# Altium footprint library Connectors.PcbLib: 120 footprints (part 6 of 8)
Each footprint in its own frame and in the unit in brackets; x right, y up, seen from the top. Pads: shape width x height; smd on the part's side, far side on the other; paste and mask are expansions set on the pad; w line width, h text height; cw(c..) or ccw(c..) is an arc to the next point about the centre after c.
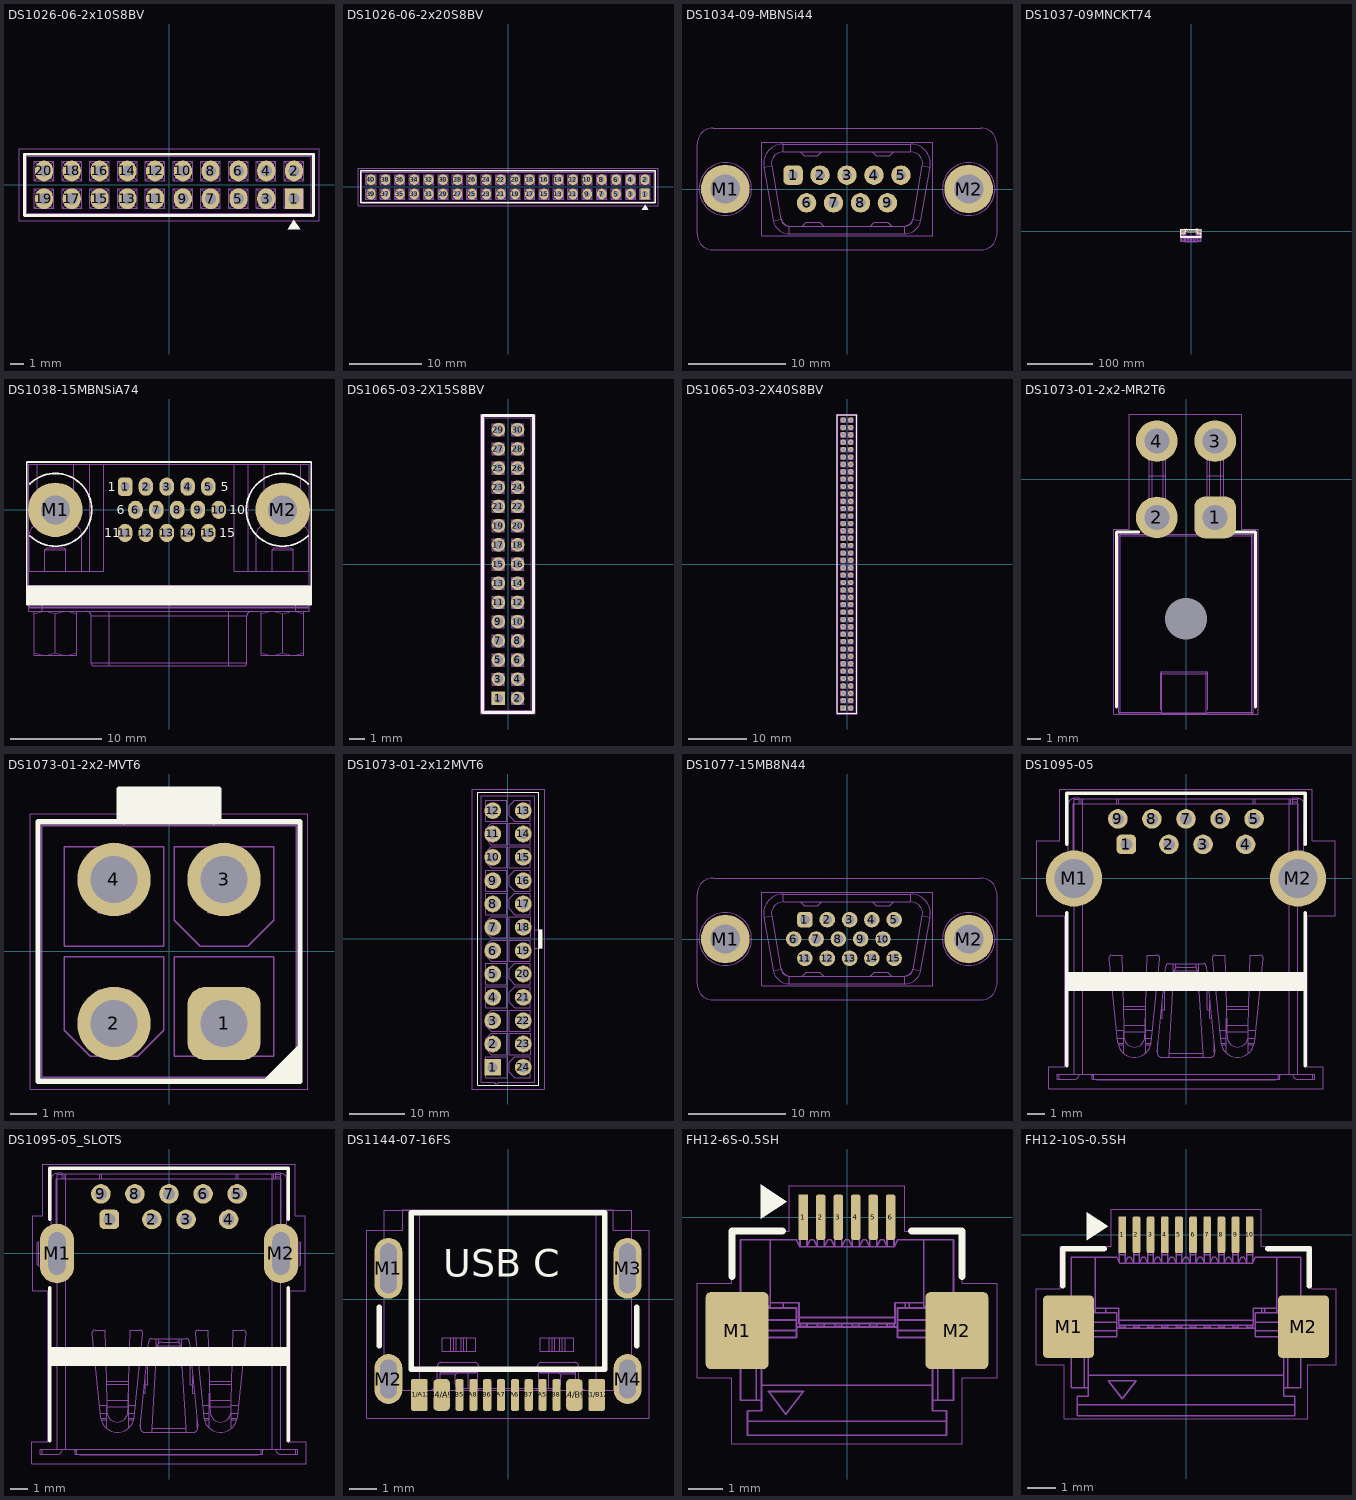
[diagram p5: the footprints below, top view; thin cyan lines are the x and y axes]

## DS1026-06-2x10S8BV [mm]
pads (20):
  rect 1.3x1.5 hole 0.8: 1(9,-1)
  oval 1.3x1.5 hole 0.8: 2(9,1) 3(7,-1) 4(7,1) 5(5,-1) 6(5,1) 7(3,-1) 8(3,1) 9(1,-1) 10(1,1) 11(-1,-1) 12(-1,1) 13(-3,-1) 14(-3,1) 15(-5,-1) 16(-5,1) 17(-7,-1) 18(-7,1) 19(-9,-1) 20(-9,1)
Top Overlay:
  region: 9,-2.5 8.533,-3.2 9.467,-3.2
  lines w0.2: -10.4,-2.2 -10.4,2.2 10.4,2.2 10.4,-2.2 -10.4,-2.2
Top Courtyard:
  lines w0.025: -10.8,-2.6 -10.8,2.6 10.8,2.6 10.8,-2.6 -10.8,-2.6
Top Assembly:
  drawing of 364 lines, arcs and shapes, not listed
  text ".Designator" at -4.511,3.047 h2
3D body "DS1026-06-2X10S8BV_.x_t": height 4.31, standoff -2.69, extent -10.25,-2.05 10.25,2.05

## DS1026-06-2x20S8BV [mm]
pads (40):
  rect 1.3x1.5 hole 0.8: 1(19,-1)
  oval 1.3x1.5 hole 0.8: 2(19,1) 3(17,-1) 4(17,1) 5(15,-1) 6(15,1) 7(13,-1) 8(13,1) 9(11,-1) 10(11,1) 11(9,-1) 12(9,1) 13(7,-1) 14(7,1) 15(5,-1) 16(5,1) 17(3,-1) 18(3,1) 19(1,-1) 20(1,1) 21(-1,-1) 22(-1,1) 23(-3,-1) 24(-3,1) 25(-5,-1) 26(-5,1) 27(-7,-1) 28(-7,1) 29(-9,-1) 30(-9,1) 31(-11,-1) 32(-11,1) 33(-13,-1) 34(-13,1) 35(-15,-1) 36(-15,1) 37(-17,-1) 38(-17,1) 39(-19,-1) 40(-19,1)
Top Overlay:
  region: 19,-2.5 18.533,-3.2 19.467,-3.2
  lines w0.2: -20.4,-2.2 20.4,-2.2 20.4,2.2 -20.4,2.2 -20.4,-2.2
Top Courtyard:
  lines w0.025: -20.8,-2.6 20.8,-2.6 20.8,2.6 -20.8,2.6 -20.8,-2.6
Top Assembly:
  drawing of 724 lines, arcs and shapes, not listed
  text ".Designator" at -4.511,3.047 h2
3D body "DS1026-06-2X20S8BV.x_t": height 4.31, standoff -2.69, extent -20.25,-2.05 20.25,2.05

## DS1034-09-MBNSi44 [mm] "D-SUB 9 pin with screw"
height 10.8
pads (11):
  rrect50% 2x2 hole 1: 1(-5.54,1.42)
  round 2 hole 1: 2(-2.77,1.42) 3(0,1.42) 4(2.77,1.42) 5(5.54,1.42) 6(-4.155,-1.42) 7(-1.385,-1.42) 8(1.385,-1.42) 9(4.155,-1.42)
  round 5 hole 3 mask+0: M1(-12.495,0) M2(12.495,0)
Top Courtyard:
  circle w0.025: c12.495,0 r2.7
  circle w0.025: c-12.495,0 r2.7
  lines w0.025: -8.75,-4.8 8.8,-4.8 8.8,4.8 -8.75,4.8 -8.75,-4.8
Top Assembly:
  drawing of 359 lines, arcs and shapes, not listed
  text "5" at 5.243,2.625 h1
  text "1" at -5.762,2.613 h1
  text "6" at -4.288,-3.251 h1
  text "9" at 4.023,-3.251 h1
  text ".Designator" at -4.511,4.847 h2
3D body "DS1034-09-MBNSi44.x_t": height 13, standoff -3.6, extent -15.4,-6.25 15.4,6.25

## DS1037-09MNCKT74 [mm] "D-SUB 9 pin with screw, right angle, 7.2mm"
height 12.5
pads (11):
  rrect50% 2x2 hole 1: 1(-5.54,1.42)
  round 2 hole 1: 2(-2.77,1.42) 3(0,1.42) 4(2.77,1.42) 5(5.54,1.42) 6(-4.155,-1.42) 7(-1.385,-1.42) 8(1.385,-1.42) 9(4.155,-1.42)
  round 6 hole 3.2 mask+0: M1(-12.5,0)
  round 6 hole 3.2 unplated mask+0: M2(12.5,0)
Top Overlay:
  rectangle: -15.7,-8.9 15.7,-7.1
  lines w0.2: -15.251,-2.904 ccw(c-12.5,0) -9.959,3.089 ; 9.959,3.089 ccw(c12.5,0) 15.251,-2.904 ; -15.7,-8.9 -15.7,3.3 -15.2,3.3 15.7,3.3 15.7,-8.9 -15.7,-8.9
  text "1" at -7.867,0.92 h1
  text "5" at 7.367,0.92 h1
  text "9" at 5.982,-1.92 h1
  text "6" at -6.648,-1.92 h1
Top Courtyard:
  lines w0.025: -15.7,-15 -15.7,3.3 15.7,3.3 15.7,-15 9.75,-15 9.75,-15.9 -8.6,-15.9 -9.75,-15.9 -9.75,-15 -15.7,-15
Top Assembly:
  lines w0.05: -15.4,-7.1 15.4,-7.1 ; -15.4,-5.5 -7.7,-5.5 -7.7,3 ; -15.395,-5.5 -15.395,-4.59 cw(c-14.795,-4.59) -14.795,-3.99 -14.3,-3.99 -14.3,0.3 ; -15.209,-9.52 -15.209,-14 ccw(c-14.709,-14) -14.709,-14.5 -10.281,-14.5 ccw(c-10.281,-14) -9.781,-14 -9.781,-9.52 ; -14.45,-0.3 -13.15,-0.3 ; -14.45,-0.25 cw(c-12.5,-0.25) -10.55,-0.25 ; -14.45,3 -14.45,-2.54 ccw(c-12.5,-2.54) -14.3,-3.29 ; -14.395,-9.1 -14.395,-9.09 ; -14.371,0.3 -13.15,0.3 -13.15,-2.5 ; -13.852,-14.5 -13.852,-9.5 ; -13.845,-5.5 -13.845,-3.1 ; -13.6,-9.5 -13.6,-9.1 ; -13.6,-9.09 -13.6,-7.1 ; -11.85,-2.5 -11.85,0.3 -10.629,0.3 ; -11.85,-0.3 -10.55,-0.3 ; -11.167,-9.501 -11.138,-14.501 ; -11.145,-5.5 -11.145,-3.1 ; -10.7,-3.29 ccw(c-12.5,-2.54) -10.55,-2.54 -10.55,3 ; -10.7,0.3 -10.7,-3.99 -10.195,-3.99 cw(c-10.195,-4.59) -9.595,-4.59 -9.595,-5.5 ; -10.595,-9.1 -10.595,-9.09 ; -9.885,-9.5 cw(c-9.885,-10.1) -9.285,-10.079 ; -9.08,-15.114 ccw(c-8.781,-15.1) -8.781,-15.4 8.781,-15.4 ccw(c8.781,-15.1) 9.08,-15.115 ; -8.7,-5.5 -8.7,3 ; -6.786,-9.5 -6.786,-10.079 ; -6.582,-15.4 -6.582,-15.11 ; -6.04,-9.1 -6.04,-9.09 ; -5.04,-9.1 -5.04,-9.09 ; -4.655,-9.1 -4.655,-9.09 ; -4.65,-13.408 -3.15,-13.408 ; -3.655,-9.1 -3.655,-9.09 ; -3.27,-9.1 -3.27,-9.09 ; -2.27,-9.1 -2.27,-9.09 ; -1.885,-9.1 -1.885,-9.09 ; -0.885,-9.1 -0.885,-9.09 ; -0.75,-13.408 0.75,-13.408 ; -0.5,-9.1 -0.5,-9.09 ; 0.5,-9.1 0.5,-9.09 ; 0.885,-9.1 0.885,-9.09 ; 1.885,-9.1 1.885,-9.09 ; 2.27,-9.1 2.27,-9.09 ; 3.15,-13.408 4.65,-13.408 ; 3.27,-9.1 3.27,-9.09 ; 3.655,-9.1 3.655,-9.09 ; 4.655,-9.1 4.655,-9.09 ; 5.04,-9.1 5.04,-9.09 ; 6.04,-9.1 6.04,-9.09 ; 6.582,-15.4 6.582,-15.11 ; 6.786,-9.5 6.786,-10.079 ; 7.7,3 7.7,-5.5 15.4,-5.5 ; 8.7,-5.5 8.7,3 ; 9.285,-10.078 cw(c9.885,-10.1) 9.885,-9.5 ; 9.595,-5.5 9.595,-4.59 cw(c10.195,-4.59) 10.195,-3.99 10.7,-3.99 10.7,0.3 ; 9.781,-9.52 9.781,-14 ccw(c10.281,-14) 10.281,-14.5 14.709,-14.5 ccw(c14.709,-14) 15.209,-14 15.209,-9.52 ; 10.55,-0.3 11.85,-0.3 ; 10.55,-0.25 cw(c12.5,-0.25) 14.45,-0.25 ; 10.55,3 10.55,-2.54 ccw(c12.5,-2.54) 10.7,-3.29 ; 10.595,-9.1 10.595,-9.09 ; 10.629,0.3 11.85,0.3 11.85,-2.5 ; 11.138,-14.501 11.167,-9.501 ; 11.145,-5.5 11.145,-3.1 ; 13.15,-2.5 13.15,0.3 14.371,0.3 ; 13.15,-0.3 14.45,-0.3 ; 13.6,-9.5 13.6,-9.1 ; 13.6,-9.09 13.6,-7.1 ; 13.845,-5.5 13.845,-3.1 ; 13.852,-14.5 13.852,-9.5 ; 14.3,-3.29 ccw(c12.5,-2.54) 14.45,-2.54 14.45,3 ; 14.3,0.3 14.3,-3.99 14.795,-3.99 cw(c14.795,-4.59) 15.395,-4.59 15.395,-5.5 ; 14.395,-9.1 14.395,-9.09 ; -13.845,-3.1 -11.145,-3.1 ; -13.845,-3.1 -13.499,-2.5 -11.491,-2.5 -11.145,-3.1 ; -6.786,-10.079 ccw(c-8.128,-77.246) -9.285,-10.076 -9.08,-15.112 ccw(c-7.938,140.625) -6.582,-15.11 ; -6.786,-10.079 -6.582,-15.11 ; -6.786,-10.079 6.786,-10.079 ; -6.582,-15.11 6.582,-15.11 ; 6.582,-15.11 ccw(c7.924,119.27) 9.08,-15.112 9.285,-10.076 ccw(c8.143,-87.965) 6.786,-10.079 ; 6.582,-15.11 6.786,-10.079 ; 11.145,-3.1 13.845,-3.1 ; 11.145,-3.1 11.491,-2.5 13.499,-2.5 13.845,-3.1 ; -15.4,-9.5 -15.4,-9.1 15.4,-9.1 15.4,-9.5 -15.4,-9.5 ; -15.4,-9.09 -15.4,3 15.4,3 15.4,-9.09 -15.4,-9.09 ; -4.65,-13.411 -3.15,-13.411 -3.15,-11.413 -4.65,-11.413 -4.65,-13.411 ; -0.75,-13.411 0.75,-13.411 0.75,-11.413 -0.75,-11.413 -0.75,-13.411 ; 3.15,-13.411 4.65,-13.411 4.65,-11.413 3.15,-11.413 3.15,-13.411
  text ".Designator" at -6.763,-2.429 h3
3D body "DS1037-09M.x_t": height 12.57, standoff -3.85, extent -15.4,-15.4 15.4,3

## DS1038-15MBNSiA74 [mm] "D-SUB 15 pin with screw, right angle, 7.2mm"
height 12.5
pads (17):
  rrect50% 1.6x2 hole 1: 1(-4.83,2.54)
  oval 1.6x2 hole 1: 2(-2.54,2.54) 3(-0.25,2.54) 4(2.04,2.54) 5(4.33,2.54) 6(-3.685,0) 7(-1.395,0) 8(0.895,0) 9(3.185,0) 10(5.475,0) 11(-4.83,-2.54) 12(-2.54,-2.54) 13(-0.25,-2.54) 14(2.04,-2.54) 15(4.33,-2.54)
  round 6 hole 3.2 mask+0: M1(-12.495,0)
  round 6 hole 3.2 unplated mask+0: M2(12.495,0)
Top Overlay:
  rectangle: -15.65,-10.45 15.65,-8.3
  lines w0.2: -15.301,-2.851 ccw(c-12.495,0) -15.301,2.851 ; 15.301,-2.851 cw(c12.495,0) 15.301,2.851 ; -15.65,-10.45 15.65,-10.45 15.65,5.25 -15.65,5.25 -15.65,-10.45
  text "15" at 5.545,-3.04 h1
  text "10" at 6.64,-0.5 h1
  text "5" at 5.712,2.04 h1
  text "1" at -6.712,2.04 h1
  text "11" at -7.128,-3.04 h1
  text "6" at -5.733,-0.5 h1
Top Assembly:
  lines w0.05: -15.42,-8.27 15.42,-8.27 ; -15.42,-6.77 -7.2,-6.77 -7.2,5.03 ; -15.37,-6.77 -15.37,-2.6 cw(c-14.57,-2.6) -14.57,-1.8 -14.345,-1.8 -14.345,0.2 ; -15.32,-10.67 ccw(c-15.32,-10.77) -15.42,-10.77 ; -14.495,0 -14.495,5.03 ; -14.485,-0.2 -14.345,-0.2 ; -14.485,0.2 -13.095,0.2 -13.095,-1.65 ccw(c-12.495,-1.65) -11.895,-1.65 -11.895,0.2 -10.505,0.2 ; -14.345,-0.76 cw(c-12.495,0) -10.645,-0.76 ; -14.345,-0.6 -13.095,-0.6 ; -13.92,-11.17 -13.92,-8.27 ; -13.855,-15.971 -14.845,-15.697 ; -13.855,-11.169 -14.845,-11.443 ; -13.645,-6.77 -13.645,-4.42 ; -13.485,-15.971 -12.495,-15.697 ; -13.485,-11.169 -12.495,-11.443 ; -13.027,-1.928 ccw(c-12.495,0) -11.963,-1.928 ; -11.895,-0.6 -10.645,-0.6 ; -11.505,-15.971 -12.495,-15.697 ; -11.505,-11.169 -12.495,-11.443 ; -11.345,-6.77 -11.345,-4.42 ; -11.135,-15.971 -10.145,-15.697 ; -11.135,-11.169 -10.145,-11.443 ; -10.645,-0.2 -10.505,-0.2 ; -10.645,0.2 -10.645,-1.8 -10.42,-1.8 cw(c-10.42,-2.6) -9.62,-2.6 -9.62,-6.77 ; -10.495,0 -10.495,5.03 ; -9.066,-11.17 cw(c-9.066,-11.67) -8.566,-11.67 ; -8.7,-6.77 -8.7,5.03 ; -6.566,-17.17 -6.566,-11.17 ; 6.566,-17.17 6.566,-11.17 ; 7.2,5.03 7.2,-6.77 15.42,-6.77 ; 8.7,-6.77 8.7,5.03 ; 9.066,-11.17 ccw(c9.066,-11.67) 8.566,-11.67 ; 9.62,-6.77 9.62,-2.6 cw(c10.42,-2.6) 10.42,-1.8 10.645,-1.8 10.645,0.2 ; 10.495,0 10.495,5.03 ; 10.505,-0.2 10.645,-0.2 ; 10.505,0.2 11.895,0.2 11.895,-1.65 ccw(c12.495,-1.65) 13.095,-1.65 13.095,0.2 14.485,0.2 ; 10.645,-0.76 cw(c12.495,0) 14.345,-0.76 ; 10.645,-0.6 11.895,-0.6 ; 11.135,-15.971 10.145,-15.697 ; 11.135,-11.169 10.145,-11.443 ; 11.345,-6.77 11.345,-4.42 ; 11.505,-15.971 12.495,-15.697 ; 11.505,-11.169 12.495,-11.443 ; 11.963,-1.928 ccw(c12.495,0) 13.027,-1.928 ; 13.095,-0.6 14.345,-0.6 ; 13.485,-15.971 12.495,-15.697 ; 13.485,-11.169 12.495,-11.443 ; 13.645,-6.77 13.645,-4.42 ; 13.855,-15.971 14.845,-15.697 ; 13.855,-11.169 14.845,-11.443 ; 13.92,-11.17 13.92,-8.27 ; 14.345,-0.2 14.485,-0.2 ; 14.345,0.2 14.345,-1.8 14.57,-1.8 cw(c14.57,-2.6) 15.37,-2.6 15.37,-6.77 ; 14.495,0 14.495,5.03 ; 15.32,-10.67 cw(c15.32,-10.77) 15.42,-10.77 ; -15.42,-10.77 -15.42,-11.17 15.42,-11.17 15.42,-10.77 ; -15.42,-10.77 15.42,-10.77 ; -14.845,-15.697 -14.845,-11.443 ; -14.845,-15.697 -14.845,-15.97 -10.145,-15.97 -10.145,-15.697 ; -14.845,-11.443 -14.845,-11.17 -10.145,-11.17 -10.145,-11.443 ; -13.645,-4.42 -11.345,-4.42 ; -13.645,-4.42 -13.395,-4.17 -11.595,-4.17 -11.345,-4.42 ; -12.495,-15.697 -12.495,-11.443 ; -10.145,-15.697 -10.145,-11.443 ; -8.566,-16.82 ccw(c-8.216,-16.82) -8.216,-17.17 8.216,-17.17 ccw(c8.216,-16.82) 8.566,-16.82 ; -8.566,-16.82 8.566,-16.82 ; -8.566,-16.82 -8.566,-11.67 ; -8.566,-11.67 8.566,-11.67 ; 8.566,-16.82 8.566,-11.67 ; 10.145,-15.697 10.145,-11.443 ; 10.145,-15.697 10.145,-15.97 14.845,-15.97 14.845,-15.697 ; 10.145,-11.443 10.145,-11.17 14.845,-11.17 14.845,-11.443 ; 11.345,-4.42 13.645,-4.42 ; 11.345,-4.42 11.595,-4.17 13.395,-4.17 13.645,-4.42 ; 12.495,-15.697 12.495,-11.443 ; 14.845,-15.697 14.845,-11.443 ; -15.42,-10.67 15.42,-10.67 15.42,5.03 -15.42,5.03 -15.42,-10.67
  text ".Designator" at -6.763,-1.679 h3
3D body "DHR-15M.x_t": height 12.52, standoff -3.98, extent -15.42,-17.17 15.42,5.03

## DS1065-03-2X15S8BV [mm] "Female header, pitch 1.27mm, Vertical"
height 4.4
pads (30):
  rect 0.9x0.9 / inner rect 1.1x0.9 / far side rect 0.9x0.9 hole 0.6: 1(-0.635,-8.89)
  round 0.9 / inner oval 1.1x0.9 / far side round 0.9 hole 0.6: 2(0.635,-8.89) 3(-0.635,-7.62) 4(0.635,-7.62) 5(-0.635,-6.35) 6(0.635,-6.35) 7(-0.635,-5.08) 8(0.635,-5.08) 9(-0.635,-3.81) 10(0.635,-3.81) 11(-0.635,-2.54) 12(0.635,-2.54) 13(-0.635,-1.27) 14(0.635,-1.27) 15(-0.635,0) 16(0.635,0) 17(-0.635,1.27) 18(0.635,1.27) 19(-0.635,2.54) 20(0.635,2.54) 21(-0.635,3.81) 22(0.635,3.81) 23(-0.635,5.08) 24(0.635,5.08) 25(-0.635,6.35) 26(0.635,6.35) 27(-0.635,7.62) 28(0.635,7.62) 29(-0.635,8.89) 30(0.635,8.89)
Top Overlay:
  lines w0.2: -1.7,-9.825 -1.7,9.825 1.7,9.825 1.7,-9.825 -1.7,-9.825
Top Courtyard:
  lines w0.025: -1.8,-9.925 -1.8,9.925 1.8,9.925 1.8,-9.925 -1.8,-9.925
Top Assembly:
  drawing of 364 lines, arcs and shapes, not listed
  text ".Designator" at 2.839,-3.378 h1.5
3D body "DS1065-03-2X15S8BV.x_t": height 4.4, standoff -2.3, extent -1.55,-9.685 1.55,9.685

## DS1065-03-2X40S8BV [mm] "Female header, pitch 1.27mm, Vertical"
height 4.4
pads (80):
  rect 0.9x0.9 / inner rect 1.1x0.9 / far side rect 0.9x0.9 hole 0.6: 1(-0.635,-24.765)
  round 0.9 / inner oval 1.1x0.9 / far side round 0.9 hole 0.6: 2(0.635,-24.765) 3(-0.635,-23.495) 4(0.635,-23.495) 5(-0.635,-22.225) 6(0.635,-22.225) 7(-0.635,-20.955) 8(0.635,-20.955) 9(-0.635,-19.685) 10(0.635,-19.685) 11(-0.635,-18.415) 12(0.635,-18.415) 13(-0.635,-17.145) 14(0.635,-17.145) 15(-0.635,-15.875) 16(0.635,-15.875) 17(-0.635,-14.605) 18(0.635,-14.605) 19(-0.635,-13.335) 20(0.635,-13.335) 21(-0.635,-12.065) 22(0.635,-12.065) 23(-0.635,-10.795) 24(0.635,-10.795) 25(-0.635,-9.525) 26(0.635,-9.525) 27(-0.635,-8.255) 28(0.635,-8.255) 29(-0.635,-6.985) 30(0.635,-6.985) 31(-0.635,-5.715) 32(0.635,-5.715) 33(-0.635,-4.445) 34(0.635,-4.445) 35(-0.635,-3.175) 36(0.635,-3.175) 37(-0.635,-1.905) 38(0.635,-1.905) 39(-0.635,-0.635) 40(0.635,-0.635) 41(-0.635,0.635) 42(0.635,0.635) 43(-0.635,1.905) 44(0.635,1.905) 45(-0.635,3.175) 46(0.635,3.175) 47(-0.635,4.445) 48(0.635,4.445) 49(-0.635,5.715) 50(0.635,5.715) 51(-0.635,6.985) 52(0.635,6.985) 53(-0.635,8.255) 54(0.635,8.255) 55(-0.635,9.525) 56(0.635,9.525) 57(-0.635,10.795) 58(0.635,10.795) 59(-0.635,12.065) 60(0.635,12.065) 61(-0.635,13.335) 62(0.635,13.335) 63(-0.635,14.605) 64(0.635,14.605) 65(-0.635,15.875) 66(0.635,15.875) 67(-0.635,17.145) 68(0.635,17.145) 69(-0.635,18.415) 70(0.635,18.415) 71(-0.635,19.685) 72(0.635,19.685) 73(-0.635,20.955) 74(0.635,20.955) 75(-0.635,22.225) 76(0.635,22.225) 77(-0.635,23.495) 78(0.635,23.495) 79(-0.635,24.765) 80(0.635,24.765)
Top Overlay:
  lines w0.2: -1.7,-25.7 1.7,-25.7 1.7,25.7 -1.7,25.7 -1.7,-25.7
Top Courtyard:
  lines w0.025: -1.8,-25.8 -1.8,25.8 1.8,25.8 1.8,-25.8 -1.8,-25.8
Top Assembly:
  drawing of 964 lines, arcs and shapes, not listed
  text ".Designator" at 2.839,-3.378 h1.5
3D body "DS1065-03-2X40S8BV.x_t": height 4.4, standoff -2.3, extent -1.55,-25.56 1.55,25.56

## DS1073-01-2x2-MR2T6 [mm]
height 0.6
pads (5):
  rrect50% 3x3 hole 1.8 mask+0.05: 1(2.1,-2.75)
  round 3 hole 1.8 mask+0.05: 2(-2.1,-2.75) 3(2.1,2.75) 4(-2.1,2.75)
  rect 0x0 hole 3 unplated paste-2539.97 mask+0.05: HOLE(0,-10.05)
Top Overlay:
  lines w0.2: -5,-16.4 -5,-3.8 -3.4,-3.8 ; 3.4,-3.8 5,-3.8 5,-16.4
Top Courtyard:
  lines w0.025: -5.2,-16.9 -5.2,-3.6 -4.1,-3.6 -4.1,4.7 -2.1,4.7 4,4.7 4,-3.6 5.2,-3.6 5.2,-16.9 -5.2,-16.9
Top Assembly:
  lines w0.05: -2.64,-3.975 -2.64,0.255 ; -2.44,-3.975 -2.44,0.255 ; -1.83,-16.589 -1.83,-13.965 ; -1.783,-16.775 -4.75,-16.775 ; -1.763,-16.808 -1.75,-16.81 -1.73,-16.81 ; -1.73,-16.841 -1.73,-16.81 ; -1.64,-3.975 -1.64,0.255 ; -1.44,-3.975 -1.44,0.255 ; -1.44,-2.375 -1.43,-2.385 -1.43,-3.975 ; 1.47,-16.841 1.47,-16.81 ; 1.503,-16.808 1.49,-16.81 1.47,-16.81 ; 1.52,-3.975 1.52,0.255 ; 1.523,-16.775 4.75,-16.775 ; 1.57,-16.589 1.57,-13.965 ; 1.72,-3.975 1.72,0.255 ; 2.52,-3.975 2.52,0.255 ; 2.72,-3.975 2.72,0.255 ; -4.85,-16.775 ccw(c-4.75,-16.775) -4.75,-16.875 ; -4.85,-16.775 -4.75,-16.775 ; -4.85,-16.775 -4.85,-4.075 ; -4.85,-4.075 cw(c-4.75,-4.075) -4.75,-3.975 ; -4.85,-4.075 -4.75,-4.075 ; -4.75,-16.875 -4.75,-16.775 ; -4.75,-16.875 4.75,-16.875 ; -4.75,-16.775 -4.75,-4.075 ; -4.75,-4.075 4.75,-4.075 ; -4.75,-4.075 -4.75,-3.975 ; -4.75,-3.975 4.75,-3.975 ; -2.64,0.255 -2.44,0.255 ; -2.64,0.255 -2.64,3.055 -2.44,3.255 ; -2.44,0.255 -1.64,0.255 ; -2.44,0.255 -2.44,3.255 ; -2.44,3.255 -1.64,3.255 ; -1.83,-13.965 cw(c-1.73,-13.965) -1.73,-13.865 ; -1.83,-13.965 -1.828,-13.974 -1.822,-13.982 -1.813,-13.99 -1.801,-13.997 -1.786,-14.003 -1.768,-14.007 -1.75,-14.01 -1.73,-14.01 ; -1.73,-16.81 1.47,-16.81 ; -1.73,-16.81 -1.73,-14.01 ; -1.73,-14.01 -1.73,-13.865 ; -1.73,-14.01 1.47,-14.01 ; -1.73,-13.865 1.47,-13.865 1.47,-13.868 ; -1.64,0.255 -1.44,0.255 ; -1.64,0.255 -1.64,3.255 ; -1.64,3.255 -1.44,3.055 -1.44,0.255 ; 1.47,-16.81 1.47,-14.01 ; 1.47,-14.01 1.47,-13.868 ; 1.47,-14.01 1.49,-14.01 1.508,-14.007 1.526,-14.003 1.541,-13.997 1.553,-13.99 1.562,-13.982 1.568,-13.974 1.57,-13.965 ; 1.47,-13.868 cw(c1.469,-13.969) 1.57,-13.965 ; 1.52,0.255 1.72,0.255 ; 1.52,0.255 1.52,3.055 1.72,3.255 ; 1.72,0.255 2.52,0.255 ; 1.72,0.255 1.72,3.255 ; 1.72,3.255 2.52,3.255 ; 2.52,0.255 2.72,0.255 ; 2.52,0.255 2.52,3.255 ; 2.52,3.255 2.72,3.055 2.72,0.255 ; 4.75,-16.875 ccw(c4.75,-16.775) 4.85,-16.775 ; 4.75,-16.875 4.75,-16.775 ; 4.75,-16.775 4.75,-4.075 ; 4.75,-16.775 4.85,-16.775 ; 4.75,-4.075 4.75,-3.975 ; 4.75,-4.075 4.85,-4.075 ; 4.75,-3.975 cw(c4.75,-4.075) 4.85,-4.075 ; 4.85,-16.775 4.85,-4.075
  text ".Designator" at -6.763,-11.179 h3
3D body "User Library-DS1073-01-2x2-MR2T6.STEP": height 11.44, standoff -3.15, extent -4.85,-16.88 4.85,3.25

## DS1073-01-2x2-MVT6 [mm]
height 0.6
pads (4):
  rrect50% 2.8x2.8 hole 1.8 mask+0.05: 1(2.1,-2.75)
  round 2.8 hole 1.8 mask+0.05: 2(-2.1,-2.75) 3(2.1,2.75) 4(-2.1,2.75)
Top Overlay:
  rectangle: -1.9,4.95 1.9,6.2
  region: 5,-4.95 5,-3.5 3.55,-4.95
  lines w0.2: -1.9,4.95 -1.9,6.2 1.9,6.2 1.9,4.95 ; -5,-4.95 -5,4.95 5,4.95 5,-4.95 -5,-4.95
Top Courtyard:
  lines w0.025: -5.3,-5.25 -5.3,5.25 5.3,5.25 5.3,-5.25 -5.3,-5.25
Top Assembly:
  lines w0.05: -2.725,-2.725 -1.475,-2.725 ; -2.725,-2.725 -2.444,-2.444 ; -2.725,-2.725 -2.725,-1.475 ; -2.725,-1.475 -1.475,-1.475 ; -2.725,-1.475 -2.444,-1.756 ; -2.725,1.475 -1.475,1.475 ; -2.725,1.475 -2.725,2.725 ; -2.725,1.475 -2.444,1.756 ; -2.725,2.725 -1.475,2.725 ; -2.725,2.725 -2.444,2.444 ; -2.444,-2.444 -2.444,-1.756 ; -2.444,-2.444 -1.756,-2.444 ; -2.444,-1.756 -1.756,-1.756 ; -2.444,1.756 -1.756,1.756 ; -2.444,1.756 -2.444,2.444 ; -2.444,2.444 -1.756,2.444 ; -1.756,-2.444 -1.475,-2.725 ; -1.756,-2.444 -1.756,-1.756 ; -1.756,-1.756 -1.475,-1.475 ; -1.756,1.756 -1.475,1.475 ; -1.756,1.756 -1.756,2.444 ; -1.756,2.444 -1.475,2.725 ; -1.7,4.8 -1.7,6.2 1.7,6.2 1.7,4.8 ; -1.7,4.8 -4.85,4.8 -4.85,-4.8 4.85,-4.8 4.85,4.8 1.7,4.8 ; -1.7,4.8 1.7,4.8 ; -1.475,-2.725 -1.475,-1.475 ; -1.475,1.475 -1.475,2.725 ; 1.475,-2.725 2.725,-2.725 ; 1.475,-2.725 1.475,-1.475 ; 1.475,-2.725 1.756,-2.444 ; 1.475,-1.475 1.756,-1.756 ; 1.475,-1.475 2.725,-1.475 ; 1.475,1.475 2.725,1.475 ; 1.475,1.475 1.475,2.725 ; 1.475,1.475 1.756,1.756 ; 1.475,2.725 2.725,2.725 ; 1.475,2.725 1.756,2.444 ; 1.756,-2.444 2.444,-2.444 ; 1.756,-2.444 1.756,-1.756 ; 1.756,-1.756 2.444,-1.756 ; 1.756,1.756 2.444,1.756 ; 1.756,1.756 1.756,2.444 ; 1.756,2.444 2.444,2.444 ; 2.444,-2.444 2.725,-2.725 ; 2.444,-2.444 2.444,-1.756 ; 2.444,-1.756 2.725,-1.475 ; 2.444,1.756 2.444,2.444 ; 2.444,1.756 2.725,1.475 ; 2.444,2.444 2.725,2.725 ; 2.725,-2.725 2.725,-1.475 ; 2.725,1.475 2.725,2.725 ; -4,-3 -3,-4 -1.2,-4 -0.2,-3 -0.2,-0.2 -4,-0.2 -4,-3 ; -4,0.2 -0.2,0.2 -0.2,4 -4,4 -4,0.2 ; 0.2,-4 4,-4 4,-0.2 0.2,-0.2 0.2,-4 ; 0.2,1.2 1.2,0.2 3,0.2 4,1.2 4,4 0.2,4 0.2,1.2
  text ".Designator" at -6.763,-6.679 h3
3D body "DS1073-01-2x2-MVT6.STEP": height 13, standoff -3.2, extent -4.85,-4.8 4.85,6.2

## DS1073-01-2x12MVT6 [mm] "ATX24"
height 5.33
pads (24):
  rect 3x3 hole 1.8: 1(-2.75,-23.1)
  round 3 hole 1.8: 2(-2.75,-18.9) 3(-2.75,-14.7) 4(-2.75,-10.5) 5(-2.75,-6.3) 6(-2.75,-2.1) 7(-2.75,2.1) 8(-2.75,6.3) 9(-2.75,10.5) 10(-2.75,14.7) 11(-2.75,18.9) 12(-2.75,23.1) 13(2.75,23.1) 14(2.75,18.9) 15(2.75,14.7) 16(2.75,10.5) 17(2.75,6.3) 18(2.75,2.1) 19(2.75,-2.1) 20(2.75,-6.3) 21(2.75,-10.5) 22(2.75,-14.7) 23(2.75,-18.9) 24(2.75,-23.1)
Top Overlay:
  rectangle: 5.5,-1.7 6.25,1.7
  lines w0.2: 5.5,-26.4 5.5,26.3 ; 5.5,-26.3 -5.4,-26.3 -5.4,26.4 5.5,26.4
Top Courtyard:
  lines w0.025: -6.5,-27 -6.5,27 6.5,27 6.5,-27 -6.5,-27
Top Assembly:
  drawing of 417 lines, arcs and shapes, not listed
  text ".Designator" at 7.953,-4.511 h2
  text "+3.3V" at -4.15,22.098 h0.5
  text "GND" at 4.65,22.462 h0.5
  text "+12V" at -4.15,18.016 h0.5
  text "+5V" at 4.65,18.199 h0.5
  text "+12V" at -4.15,13.816 h0.5
  text "+5V" at 4.65,13.999 h0.5
  text "+5VSB" at -4.15,9.378 h0.5
  text "+5V" at 4.65,9.799 h0.5
  text "PGOOD" at -4.15,5.178 h0.5
  text "-5V" at 4.65,5.599 h0.5
  text "GND" at -4.15,1.462 h0.5
  text "GND" at 4.65,1.462 h0.5
  text "+5V" at -4.15,-2.801 h0.5
  text "GND" at 4.65,-2.738 h0.5
  text "GND" at -4.15,-6.938 h0.5
  text "GND" at 4.65,-6.938 h0.5
  text "+5V" at -4.15,-11.201 h0.5
  text "PSON" at 4.65,-11.361 h0.5
  text "GND" at -4.15,-15.338 h0.5
  text "GND" at 4.65,-15.338 h0.5
  text "+3.3V" at -4.15,-19.902 h0.5
  text "-12V" at 4.65,-19.784 h0.5
  text "+3.3V" at -4.15,-24.102 h0.5
  text "+3.3V" at 4.65,-24.102 h0.5
3D body "DS1073-01-2x12MVT6.x_t": height 12.8, standoff -3.2, extent -4.8,-26.097 6.1,25.75

## DS1077-15MB8N44 [mm] "D-SUB 15 pin with screw"
height 10.8
pads (17):
  rrect50% 1.6x1.6 hole 1: 1(-4.32,1.98)
  round 1.6 hole 1: 2(-2.03,1.98) 3(0.26,1.98) 4(2.55,1.98) 5(4.84,1.98) 6(-5.465,0) 7(-3.175,0) 8(-0.885,0) 9(1.405,0) 10(3.695,0) 11(-4.32,-1.98) 12(-2.03,-1.98) 13(0.26,-1.98) 14(2.55,-1.98) 15(4.84,-1.98)
  round 5 hole 3 mask+0: M1(-12.495,0) M2(12.495,0)
Top Courtyard:
  circle w0.025: c12.495,0 r2.7
  circle w0.025: c-12.495,0 r2.7
  lines w0.025: -8.75,-4.8 8.8,-4.8 8.8,4.8 -8.75,4.8 -8.75,-4.8
Top Assembly:
  drawing of 365 lines, arcs and shapes, not listed
  text ".Designator" at -4.511,4.847 h2
  text "5" at 5.243,2.625 h1
  text "1" at -5.762,2.613 h1
  text "11" at -5.389,-3.322 h1
  text "15" at 5.051,-3.316 h1
  text "6" at -6.714,-0.316 h1
  text "10" at 4.56,-0.316 h1
3D body "DS1077-15MB8N44.x_t": height 13, standoff -3.6, extent -15.4,-6.25 15.4,6.25

## DS1095-05 [mm]
height 0.6
pads (11):
  rrect50% 1.15x1.15 hole 0.7 mask+0.05: 1(-3.5,2)
  round 1.15 hole 0.7 mask+0.05: 2(-1,2) 3(1,2) 4(3.5,2) 5(4,3.5) 6(2,3.5) 7(0,3.5) 8(-2,3.5) 9(-4,3.5)
  round 3.3 hole 2.3 mask+0.05: M1(-6.57,0) M2(6.57,0)
Top Overlay:
  region: -7,-5.5 -7,-6.5 7,-6.5 7,-5.5
  lines w0.2: -7,-11 -7,-2 ; -7,-6.5 7,-6.5 ; -7,2 -7,5 7,5 7,2 ; 7,-11 7,-2
Top Courtyard:
  lines w0.025: -8.75,-2.2 -8.75,2.2 -7.4,2.2 -7.4,5.25 7.4,5.25 7.4,2.2 8.75,2.2 8.75,-2.2 7.1,-2.2 7.1,-11.05 8.05,-11.05 8.05,-11.8 8.05,-12.35 -8.05,-12.35 -8.05,-11.8 -8.05,-11.05 -7.1,-11.05 -7.1,-2.2 -8.75,-2.2
Top Assembly:
  drawing of 287 lines, arcs and shapes, not listed
  text ".Designator" at -6.763,-0.679 h3
3D body "Download_STP_692121030100 (rev1).stp": height 8.02, standoff -3.2, extent -7.74,-11.8 7.74,4.75

## DS1095-05_SLOTS [mm]
height 0.6
pads (11):
  rrect50% 1.15x1.15 hole 0.7 mask+0.05: 1(-3.5,2)
  round 1.15 hole 0.7 mask+0.05: 2(-1,2) 3(1,2) 4(3.5,2) 5(4,3.5) 6(2,3.5) 7(0,3.5) 8(-2,3.5) 9(-4,3.5)
  oval 2x3.5 hole 1 slot 2.5 at 90 deg: M1(-6.57,0) M2(6.57,0)
Top Overlay:
  region: -7,-5.5 -7,-6.5 7,-6.5 7,-5.5
  lines w0.2: -7,-11 -7,-2 ; -7,-6.5 7,-6.5 ; -7,2 -7,5 7,5 7,2 ; 7,-11 7,-2
Top Courtyard:
  lines w0.025: -8.05,-12.35 8.05,-12.35 8.05,-11.8 8.05,-11.05 7.1,-11.05 7.1,-2.2 8,-2.2 8,2.2 7.4,2.2 7.4,5.25 -7.4,5.25 -7.4,2.2 -8,2.2 -8,-2.2 -7.1,-2.2 -7.1,-11.05 -8.05,-11.05 -8.05,-11.8 -8.05,-12.35
Top Assembly:
  drawing of 287 lines, arcs and shapes, not listed
  text ".Designator" at -6.763,-0.679 h3
3D body "Download_STP_692121030100 (rev1).stp": height 8.02, standoff -3.2, extent -7.74,-11.8 7.74,4.75

## DS1144-07-16FS [mm] "USB TYPE C 16pin SMT Connector L=6.5mm"
pads (16):
  rrect20% 0.6x1.15 smd paste+0 mask+0.05: A1/B12(3.2,-3.45) B1/A12(-3.2,-3.45)
  rrect50% 0.6x1.15 smd paste+0 mask+0.05: A4/B9(2.4,-3.45) B4/A9(-2.4,-3.45)
  rrect50% 0.3x1.15 smd paste+0 mask+0.05: A5(1.25,-3.45) A6(0.25,-3.45) A7(-0.25,-3.45) A8(-1.25,-3.45) B5(-1.75,-3.45) B6(-0.75,-3.45) B7(0.75,-3.45) B8(1.75,-3.45)
  oval 1x2.2 hole 0.6 slot 1.8 at 90 deg paste-2539.97 mask+0.05: M1(-4.32,1.125) M3(4.32,1.125)
  oval 1x1.8 hole 0.6 slot 1.4 at 90 deg paste-2539.97 mask+0.05: M2(-4.32,-2.875) M4(4.32,-2.875)
Top Overlay:
  lines w0.2: -4.65,-1.675 -4.65,-0.275 ; 4.65,-1.675 4.65,-0.275 ; -3.5,-2.517 3.5,-2.517 3.5,3.133 -3.5,3.133 -3.5,-2.517
  text "USB C" at -2.333,0.825 h1
Top Courtyard:
  lines w0.025: -5.1,-4.3 -5.1,2.5 -3.8,2.5 -3.8,3.25 3.8,3.25 3.8,2.5 5.1,2.5 5.1,-4.3 -5.1,-4.3
Top Assembly:
  drawing of 152 lines, arcs and shapes, not listed
  text ".Designator" at -4.511,-0.453 h2
3D body "USBC_6.5MM.x_t": height 3.26, standoff -0.81, extent -4.47,-3.513 4.47,3.237

## FH12-6S-0.5SH [mm] "CONN FPC/FFC 6POS 0.5MM ZIF Contact Bottom"
height 2
pads (8):
  rect 0.275x1.3 smd paste-0.012 mask+0.04: 1(-1.25,0)
  rrect50% 0.275x1.3 smd paste-0.012 mask+0.04: 2(-0.75,0) 3(-0.25,0) 4(0.25,0) 5(0.75,0) 6(1.25,0)
  rrect15% 1.8x2.2 smd paste-2 mask+0.05: M1(-3.15,-3.25) M2(3.15,-3.25)
Top Overlay:
  region: -1.725,0.45 -2.475,-0.05 -2.475,0.95
  lines w0.2: -3.3,-1.7 -3.3,-0.4 -1.85,-0.4 ; 1.85,-0.4 3.3,-0.4 3.3,-1.7
Top Paste:
  rectangle: -4.05,-4.35 -3.25,-3.35
  region: -2.25,-3.35 -3.05,-3.35 -3.05,-4.35 -2.25,-4.35
  rectangle: -4.05,-3.15 -3.25,-2.15
  region: -2.25,-2.15 -3.05,-2.15 -3.05,-3.15 -2.25,-3.15
  rectangle: 2.25,-4.35 3.05,-3.35
  region: 4.05,-3.35 3.25,-3.35 3.25,-4.35 4.05,-4.35
  rectangle: 2.25,-3.15 3.05,-2.15
  region: 4.05,-2.15 3.25,-2.15 3.25,-3.15 4.05,-3.15
Top Courtyard:
  lines w0.025: -4.3,-4.6 -3.3,-4.6 -3.3,-6.5 3.3,-6.5 3.3,-4.6 4.3,-4.6 4.3,-1.9 3.3,-1.9 3.3,-0.4 1.65,-0.4 1.65,0.9 -1.65,0.9 -1.65,-0.4 -3.3,-0.4 -3.3,-1.9 -4.3,-1.9 -4.3,-4.6
Top Assembly:
  lines w0.05: -3.35,-3.85 -3.35,-2.65 ; -3.3,-3.85 -3.3,-2.65 ; -3.05,-3.85 -3.55,-3.85 -3.55,-2.65 -3.05,-2.65 ; -3.05,-2.55 -2.2,-2.55 -2.2,-0.65 ; -2.85,-5.85 2.85,-5.85 ; -2.6,-5.25 -2.6,-3.9 -2.45,-3.9 ; -2.45,-5.25 -3.05,-5.25 -3.05,-0.65 -1.45,-0.65 -1.348,-0.85 1.35,-0.85 1.35,0.15 1.15,0.15 1.15,-0.85 ; -2.45,-4.82 2.45,-4.82 ; -2.45,-3.45 -1.45,-3.45 -1.45,-2.6 -2.45,-2.6 ; -2.45,-3.25 -1.45,-3.25 ; -2.45,-2.95 -1.45,-2.95 ; -2.45,-2.55 -2.45,-5.55 -2.85,-5.55 -2.85,-6.25 2.85,-6.25 2.85,-5.55 2.45,-5.55 2.45,-2.55 ; -2.2,-2.45 -1.375,-2.45 -1.375,-3.05 1.375,-3.05 1.375,-2.45 2.2,-2.45 ; -1.828,-2.6 -1.828,-2.45 ; -1.45,-3.15 1.45,-3.15 ; -1.375,-2.877 1.375,-2.877 ; -1.35,-3.15 -1.35,-3.05 ; -1.35,-3.123 -1.15,-3.123 ; -1.35,-0.845 -1.35,0.15 -1.15,0.15 -1.15,-0.85 ; -1.35,-0.55 -1.15,-0.55 ; -1.35,-0.45 -1.15,-0.45 ; -1.35,-0.25 -1.15,-0.25 ; -1.35,-0.15 -1.15,-0.15 ; -1.35,-0.05 -1.15,-0.05 ; -1.15,-3.15 -1.15,-3.05 ; -1.15,-0.845 -1.05,-0.65 -0.95,-0.65 -0.85,-0.845 ; -0.85,-3.15 -0.85,-3.05 ; -0.85,-3.123 -0.65,-3.123 ; -0.85,-0.85 -0.85,0.15 -0.65,0.15 -0.65,-0.85 ; -0.85,-0.55 -0.65,-0.55 ; -0.85,-0.45 -0.65,-0.45 ; -0.85,-0.25 -0.65,-0.25 ; -0.85,-0.15 -0.65,-0.15 ; -0.85,-0.05 -0.65,-0.05 ; -0.65,-3.15 -0.65,-3.05 ; -0.65,-0.845 -0.55,-0.65 -0.45,-0.65 -0.35,-0.845 ; -0.35,-3.15 -0.35,-3.05 ; -0.35,-3.123 -0.15,-3.123 ; -0.35,-0.85 -0.35,0.15 -0.15,0.15 -0.15,-0.85 ; -0.35,-0.55 -0.15,-0.55 ; -0.35,-0.45 -0.15,-0.45 ; -0.35,-0.25 -0.15,-0.25 ; -0.35,-0.15 -0.15,-0.15 ; -0.35,-0.05 -0.15,-0.05 ; -0.15,-3.15 -0.15,-3.05 ; -0.15,-0.845 -0.05,-0.65 0.05,-0.65 0.15,-0.845 ; 0.15,-3.15 0.15,-3.05 ; 0.15,-3.123 0.35,-3.123 ; 0.15,-0.85 0.15,0.15 0.35,0.15 0.35,-0.85 ; 0.15,-0.55 0.35,-0.55 ; 0.15,-0.45 0.35,-0.45 ; 0.15,-0.25 0.35,-0.25 ; 0.15,-0.15 0.35,-0.15 ; 0.15,-0.05 0.35,-0.05 ; 0.35,-3.15 0.35,-3.05 ; 0.35,-0.845 0.45,-0.65 0.55,-0.65 0.65,-0.845 ; 0.65,-3.15 0.65,-3.05 ; 0.65,-3.123 0.85,-3.123 ; 0.65,-0.85 0.65,0.15 0.85,0.15 0.85,-0.85 ; 0.65,-0.55 0.85,-0.55 ; 0.65,-0.45 0.85,-0.45 ; 0.65,-0.25 0.85,-0.25 ; 0.65,-0.15 0.85,-0.15 ; 0.65,-0.05 0.85,-0.05 ; 0.85,-3.15 0.85,-3.05 ; 0.85,-0.845 0.95,-0.65 1.05,-0.65 1.15,-0.845 ; 1.15,-3.15 1.15,-3.05 ; 1.15,-3.123 1.35,-3.123 ; 1.15,-0.55 1.35,-0.55 ; 1.15,-0.45 1.35,-0.45 ; 1.15,-0.25 1.35,-0.25 ; 1.15,-0.15 1.35,-0.15 ; 1.15,-0.05 1.35,-0.05 ; 1.35,-3.15 1.35,-3.05 ; 1.35,-0.845 1.45,-0.65 3.05,-0.65 3.05,-5.25 2.45,-5.25 ; 1.45,-3.25 2.45,-3.25 ; 1.45,-2.95 2.45,-2.95 ; 1.672,-2.6 1.672,-2.45 ; 1.785,-2.6 1.785,-2.45 ; 2.2,-0.65 2.2,-2.55 3.05,-2.55 ; 2.45,-3.9 2.6,-3.9 2.6,-5.25 ; 2.45,-3.45 1.45,-3.45 1.45,-2.6 2.45,-2.6 ; 3.05,-3.85 3.55,-3.85 3.55,-2.65 3.05,-2.65 ; 3.3,-3.85 3.3,-2.65 ; 3.35,-3.85 3.35,-2.65 ; -2.25,-5 -1.25,-5 -1.75,-5.65 -2.25,-5
  text ".Designator" at -4.511,-2.303 h2
3D body "FH12-6S-0.5SH.x_t": height 2.09, standoff -0.01, extent -3.55,-6.25 3.55,0.15

## FH12-10S-0.5SH [mm] "CONN FPC/FFC 10POS .5MM ZIF Contact Bottom"
height 2
pads (12):
  rect 0.275x1.3 smd paste-0.012 mask+0.04: 1(-2.25,0)
  rrect50% 0.275x1.3 smd paste-0.012 mask+0.04: 2(-1.75,0) 3(-1.25,0) 4(-0.75,0) 5(-0.25,0) 6(0.25,0) 7(0.75,0) 8(1.25,0) 9(1.75,0) 10(2.25,0)
  rrect15% 1.8x2.2 smd paste-2 mask+0.05: M1(-4.15,-3.25) M2(4.15,-3.25)
Top Overlay:
  region: -2.75,0.3 -3.5,-0.2 -3.5,0.8
  lines w0.2: -4.35,-1.8 -4.35,-0.5 -2.9,-0.5 ; 2.9,-0.5 4.35,-0.5 4.35,-1.8
Top Paste:
  rectangle: -5.05,-4.35 -4.25,-3.35
  region: -3.25,-3.35 -4.05,-3.35 -4.05,-4.35 -3.25,-4.35
  rectangle: -5.05,-3.15 -4.25,-2.15
  region: -3.25,-2.15 -4.05,-2.15 -4.05,-3.15 -3.25,-3.15
  rectangle: 3.25,-4.35 4.05,-3.35
  region: 5.05,-3.35 4.25,-3.35 4.25,-4.35 5.05,-4.35
  rectangle: 3.25,-3.15 4.05,-2.15
  region: 5.05,-2.15 4.25,-2.15 4.25,-3.15 5.05,-3.15
Top Courtyard:
  lines w0.025: -5.3,-4.6 -5.3,-1.9 -4.45,-1.9 -4.45,-0.4 -2.65,-0.4 -2.65,0.9 2.65,0.9 2.65,-0.4 4.45,-0.4 4.45,-1.9 5.3,-1.9 5.3,-4.6 4.3,-4.6 4.3,-6.5 -4.3,-6.5 -4.3,-4.6 -5.3,-4.6
Top Assembly:
  drawing of 196 lines, arcs and shapes, not listed
  text ".Designator" at -4.511,-2.303 h2
3D body "FH12-10S-0.5SH.x_t": height 2.09, standoff -0.01, extent -4.55,-6.25 4.55,0.15